# Altium footprint library W25N01GVZEIG.PcbLib: 3 footprints
Each footprint in its own frame and in the unit in brackets; x right, y up, seen from the top. Pads: shape width x height; smd on the part's side, far side on the other; paste and mask are expansions set on the pad; w line width, h text height; cw(c..) or ccw(c..) is an arc to the next point about the centre after c.
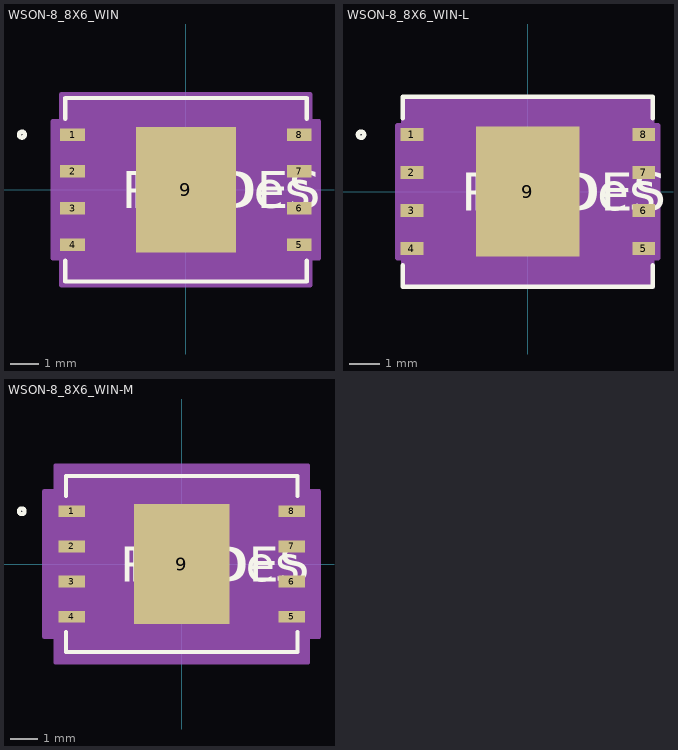
[diagram p0: the footprints below, top view; thin cyan lines are the x and y axes]

## WSON-8_8X6_WIN [mil]
pads (9):
  rect 33.81x17.03 smd paste+0 mask+0: 1(-154.41,75) 2(-154.41,25) 3(-154.41,-25) 4(-154.41,-75) 5(154.41,-75) 6(154.41,-25) 7(154.41,25) 8(154.41,75)
  rect 136x171 smd paste+0 mask+0: 9(0,0)
Top Overlay:
  circle w6: c-223.31,75 r4
  lines w6: -164.5,-96.62 -164.5,-125 164.5,-125 164.5,-96.62 ; -164.5,96.62 -164.5,125 164.5,125 164.5,96.62
  text "RefDes" at -75,-25 h50
  text "REFDES" at -87.5,-25 h50
Top Paste:
  region: -3.94,81.56 -64.06,81.56 -64.06,32.44 -3.94,32.44
  region: -3.94,24.56 -64.06,24.56 -64.06,-24.56 -3.94,-24.56
  region: -3.94,-32.44 -64.06,-32.44 -64.06,-81.56 -3.94,-81.56
  region: 64.06,81.56 3.94,81.56 3.94,32.44 64.06,32.44
  region: 64.06,24.56 3.94,24.56 3.94,-24.56 64.06,-24.56
  region: 64.06,-32.44 3.94,-32.44 3.94,-81.56 64.06,-81.56
Mechanical 13:
  circle w0: c-137.5,75 r3
  lines w0: -12,120 ccw(c0,120) 12,120
  lines w1: -159.5,-120 159.5,-120 159.5,120 -159.5,120 -159.5,-120
  text "RefDes2" at -87.5,-25 h50
Mechanical 15:
  region: -169.5,-93.52 -181.31,-93.52 -181.31,93.52 -169.5,93.52 -169.5,130 169.5,130 169.5,93.52 181.31,93.52 181.31,-93.52 169.5,-93.52 169.5,-130 -169.5,-130
  lines w6: -181.31,-93.52 -181.31,93.52 -169.5,93.52 -169.5,130 169.5,130 169.5,93.52 181.31,93.52 181.31,-93.52 169.5,-93.52 169.5,-130 -169.5,-130 -169.5,-93.52 -181.31,-93.52
3D body "WSON-8_8X6_WIN.step": height 19.09, standoff 0, extent -159.49,-120 159.49,120

## WSON-8_8X6_WIN-L [mil]
pads (9):
  rect 29.87x17.03 smd paste+0 mask+0: 1(-152.44,75) 2(-152.44,25) 3(-152.44,-25) 4(-152.44,-75) 5(152.44,-75) 6(152.44,-25) 7(152.44,25) 8(152.44,75)
  rect 136x171 smd paste+0 mask+0: 9(0,0)
Top Overlay:
  circle w6: c-219.37,75 r4
  lines w6: -164.5,-96.62 -164.5,-125 164.5,-125 164.5,-96.62 ; -164.5,96.62 -164.5,125 164.5,125 164.5,96.62
  text "RefDes" at -75,-25 h50
  text "REFDES" at -87.5,-25 h50
Top Paste:
  region: -3.94,81.56 -64.06,81.56 -64.06,32.44 -3.94,32.44
  region: -3.94,24.56 -64.06,24.56 -64.06,-24.56 -3.94,-24.56
  region: -3.94,-32.44 -64.06,-32.44 -64.06,-81.56 -3.94,-81.56
  region: 64.06,81.56 3.94,81.56 3.94,32.44 64.06,32.44
  region: 64.06,24.56 3.94,24.56 3.94,-24.56 64.06,-24.56
  region: 64.06,-32.44 3.94,-32.44 3.94,-81.56 64.06,-81.56
Mechanical 13:
  circle w0: c-137.5,75 r3
  lines w0: -12,120 ccw(c0,120) 12,120
  lines w1: -159.5,-120 159.5,-120 159.5,120 -159.5,120 -159.5,-120
  text "RefDes2" at -87.5,-25 h50
Mechanical 15:
  region: -163.5,-87.52 -171.37,-87.52 -171.37,87.52 -163.5,87.52 -163.5,124 163.5,124 163.5,87.52 171.37,87.52 171.37,-87.52 163.5,-87.52 163.5,-124 -163.5,-124
  lines w6: -171.37,-87.52 -171.37,87.52 -163.5,87.52 -163.5,124 163.5,124 163.5,87.52 171.37,87.52 171.37,-87.52 163.5,-87.52 163.5,-124 -163.5,-124 -163.5,-87.52 -171.37,-87.52
3D body "WSON-8_8X6_WIN.step": height 19.09, standoff 0, extent -159.49,-120 159.49,120

## WSON-8_8X6_WIN-M [mil]
pads (9):
  rect 37.75x17.03 smd paste+0 mask+0: 1(-156.37,75) 2(-156.37,25) 3(-156.37,-25) 4(-156.37,-75) 5(156.37,-75) 6(156.37,-25) 7(156.37,25) 8(156.37,75)
  rect 136x171 smd paste+0 mask+0: 9(0,0)
Top Overlay:
  circle w6: c-227.25,75 r4
  lines w6: -164.5,-96.62 -164.5,-125 164.5,-125 164.5,-96.62 ; -164.5,96.62 -164.5,125 164.5,125 164.5,96.62
  text "RefDes" at -75,-25 h50
  text "REFDES" at -87.5,-25 h50
Top Paste:
  region: -3.94,81.56 -64.06,81.56 -64.06,32.44 -3.94,32.44
  region: -3.94,24.56 -64.06,24.56 -64.06,-24.56 -3.94,-24.56
  region: -3.94,-32.44 -64.06,-32.44 -64.06,-81.56 -3.94,-81.56
  region: 64.06,81.56 3.94,81.56 3.94,32.44 64.06,32.44
  region: 64.06,24.56 3.94,24.56 3.94,-24.56 64.06,-24.56
  region: 64.06,-32.44 3.94,-32.44 3.94,-81.56 64.06,-81.56
Mechanical 13:
  circle w0: c-137.5,75 r3
  lines w0: -12,120 ccw(c0,120) 12,120
  lines w1: -159.5,-120 159.5,-120 159.5,120 -159.5,120 -159.5,-120
  text "RefDes2" at -87.5,-25 h50
Mechanical 15:
  region: -179.5,-103.52 -195.25,-103.52 -195.25,103.52 -179.5,103.52 -179.5,140 179.5,140 179.5,103.52 195.25,103.52 195.25,-103.52 179.5,-103.52 179.5,-140 -179.5,-140
  lines w6: -195.25,-103.52 -195.25,103.52 -179.5,103.52 -179.5,140 179.5,140 179.5,103.52 195.25,103.52 195.25,-103.52 179.5,-103.52 179.5,-140 -179.5,-140 -179.5,-103.52 -195.25,-103.52
3D body "WSON-8_8X6_WIN.step": height 19.09, standoff 0, extent -159.49,-120 159.49,120